# Altium footprint library Relay.PcbLib: 1 footprints
Each footprint in its own frame and in the unit in brackets; x right, y up, seen from the top. Pads: shape width x height; smd on the part's side, far side on the other; paste and mask are expansions set on the pad; w line width, h text height; cw(c..) or ccw(c..) is an arc to the next point about the centre after c.
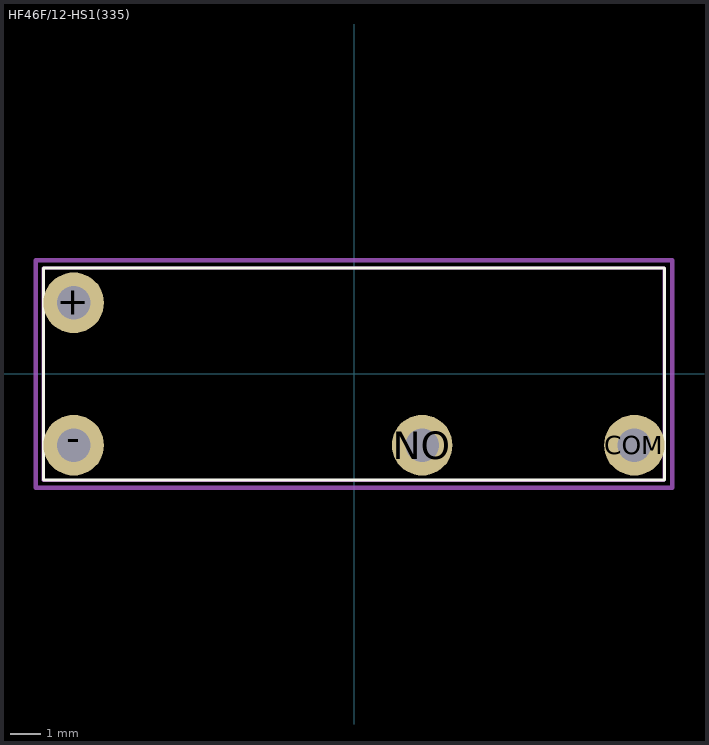
[diagram p0: the footprint, top view; thin cyan lines are the x and y axes]

## HF46F/12-HS1(335) [mm]
pads (4):
  round 2 hole 1.1: +(-9.25,2.35) -(-9.25,-2.35) COM(9.25,-2.35) NO(2.25,-2.35)
Top Overlay:
  lines w0.1: -10.25,-3.5 -10.25,3.5 10.25,3.5 10.25,-3.5 -10.25,-3.5
Top Assembly (Mech13):
  rectangle: -9.5,2.25 -9,2.5
  rectangle: -9.5,-2.45 -9,-2.2
  region: 2.35,-2.5 2.35,-2 2.1,-2 2.1,-2.5
  region: 9.35,-2.5 9.35,-2 9.1,-2 9.1,-2.5
  lines w0.1: -10.266,-3.507 -10.266,3.493 10.234,3.493 10.234,-3.507 -10.266,-3.507
  text ".Designator" at -3.764,-0.257 h0.75
Mechanical 15:
  lines w0.152: -10.5,-3.75 10.5,-3.75 10.5,3.75 -10.5,3.75 -10.5,-3.75
3D body "hf46f.stp": height 15.51, standoff -3.21, extent -10.203,-3.5 10.203,3.5